# Altium footprint library WE-SLSP.PcbLib: 1 footprints
Each footprint in its own frame and in the unit in brackets; x right, y up, seen from the top. Pads: shape width x height; smd on the part's side, far side on the other; paste and mask are expansions set on the pad; w line width, h text height; cw(c..) or ccw(c..) is an arc to the next point about the centre after c.
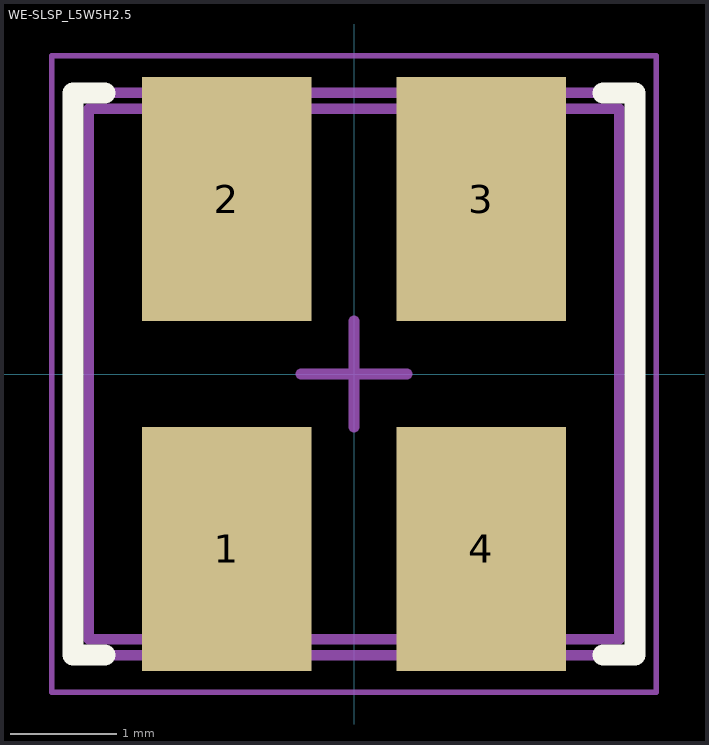
[diagram p0: the footprint, top view; thin cyan lines are the x and y axes]

## WE-SLSP_L5W5H2.5 [mm] "Common Mode Data Line Choke"
height 2.5
pads (4):
  rect 1.6x2.3 smd: 1(-1.2,-1.65) 2(-1.2,1.65) 3(1.2,1.65) 4(1.2,-1.65)
Top Overlay:
  lines w0.2: -2.35,-2.65 -2.65,-2.65 -2.65,2.65 -2.35,2.65 ; 2.35,-2.65 2.65,-2.65 2.65,2.65 2.35,2.65
Top Assembly:
  lines w0.1: -2.65,-2.65 -2.65,2.65 2.65,2.65 2.65,-2.65 -2.65,-2.65
Top Designator:
  text ".Designator" at -3.647,-0.357 h1
Top 3D Body:
  lines w0.1: -2.5,-2.5 -2.5,2.5 2.5,2.5 2.5,-2.5 -2.5,-2.5
Top Courtyard:
  lines w0.05: -2.85,-3 -2.85,3 2.85,3 2.85,-3 -2.85,-3
Top Component Center:
  lines w0.1: -0.5,0 0.5,0 ; 0,-0.5 0,0.5
3D body "744241xxx.stp": height 2.46, standoff 0.01, extent -2.5,-2.5 2.5,2.5